# Altium footprint library amirlib.PcbLib: 456 footprints (part 5 of 29)
Each footprint in its own frame and in the unit in brackets; x right, y up, seen from the top. Pads: shape width x height; smd on the part's side, far side on the other; paste and mask are expansions set on the pad; w line width, h text height; cw(c..) or ccw(c..) is an arc to the next point about the centre after c.
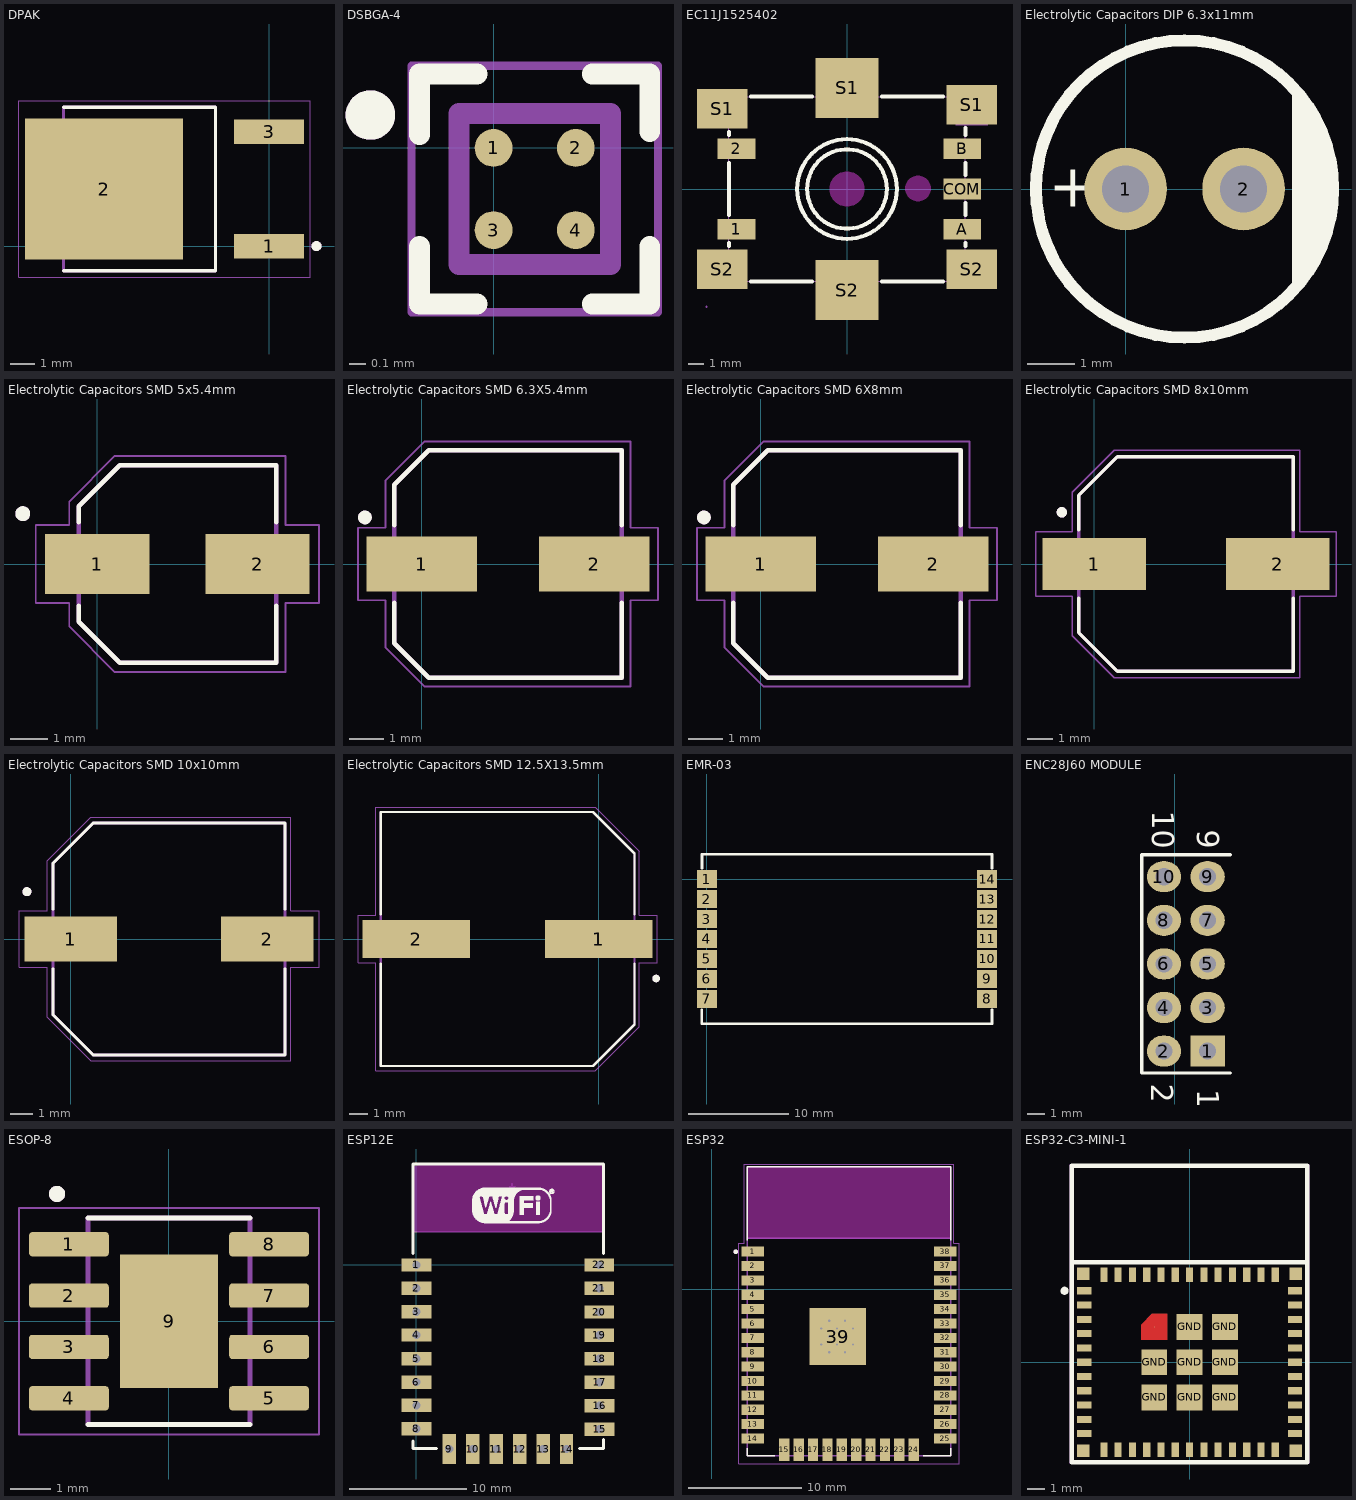
[diagram p4: the footprints below, top view; thin cyan lines are the x and y axes]

## DPAK [mm]
pads (3):
  rect 2.81x0.98 smd: 1(0,0) 3(0,4.58)
  rect 6.33x5.67 smd: 2(-6.62,2.29)
Top Overlay:
  circle w0.2: c1.905,0 r0.1
  lines w0.127: -8.245,-0.992 -2.145,-0.992 -2.145,5.573 -8.245,5.573
Top Paste:
  region: -9.495,4.835 -7.965,4.835 -7.965,3.525 -9.495,3.525
  region: -7.385,4.835 -5.855,4.835 -5.855,3.525 -7.385,3.525
  region: -5.275,4.835 -3.745,4.835 -3.745,3.525 -5.275,3.525
  region: -9.495,1.055 -7.965,1.055 -7.965,-0.255 -9.495,-0.255
  region: -7.385,1.055 -5.855,1.055 -5.855,-0.255 -7.385,-0.255
  region: -5.275,1.055 -3.745,1.055 -3.745,-0.255 -5.275,-0.255
  region: -9.495,2.945 -7.965,2.945 -7.965,1.635 -9.495,1.635
  region: -5.275,2.945 -3.745,2.945 -3.745,1.635 -5.275,1.635
  region: -7.385,2.945 -5.855,2.945 -5.855,1.635 -7.385,1.635
Mechanical 13:
  circle w0.2: c1.905,0 r0.1
  lines w0.127: -8.245,-0.992 -2.145,-0.992 -2.145,5.573 -8.245,5.573 -8.245,-0.992
Mechanical 15:
  lines w0.05: -10.035,-1.242 -10.035,5.822 1.655,5.822 1.655,-1.242 -10.035,-1.242

## DSBGA-4 [mm]
pads (4):
  round 0.23 smd: 1(0,0) 2(0.5,0) 3(0,-0.5) 4(0.5,-0.5)
Top Overlay:
  circle w0.15: c-0.75,0.2 r0.075
  lines w0.127: -0.45,-0.6 -0.45,-0.95 -0.1,-0.95 ; -0.45,0.08 -0.45,0.45 -0.1,0.45 ; 0.6,-0.95 0.95,-0.95 0.95,-0.6 ; 0.6,0.45 0.95,0.45 0.95,0.1
Mechanical 13:
  circle w0.15: c-0.75,0.2 r0.075
  lines w0.127: -0.21,-0.71 0.71,-0.71 0.71,0.21 -0.21,0.21 -0.21,-0.71
Mechanical 15:
  lines w0.05: -0.5,-1 1,-1 1,0.5 -0.5,0.5 -0.5,-1
3D body "TPS22908YZTR.STEP": height 0.63, standoff 0, extent -0.194,-0.694 0.694,0.194

## EC11J1525402 [mm]
pads (11):
  rect 2.4x1.3 smd paste+0 mask+0.05: 1(-7,-2.54) 2(-7,2.54) A(7.3,-2.54) B(7.3,2.54) COM(7.3,0)
  rect 3.2x2.5 smd paste+0 mask+0.05: S1(-7.9,5.08) S1(7.9,5.334) S2(-7.9,-5.08) S2(7.9,-5.08)
  rect 4x3.8 smd paste+0 mask+0.05: S1(0,6.4) S2(0,-6.4)
Top Overlay:
  circle w0.254: c0,0 r2.518
  circle w0.254: c0,0 r3.157
  lines w0.254: -7.473,-3.599 -7.473,-3.421 ; -7.473,-1.659 -7.473,1.659 ; -7.473,3.421 -7.473,3.599 ; -6.069,-5.852 -2.231,-5.852 ; -6.069,5.872 -2.231,5.872 ; 2.231,-5.852 6.069,-5.852 ; 2.231,5.847 6.069,5.847 ; 7.497,-3.599 7.497,-3.421 ; 7.497,-1.659 7.497,-0.881 ; 7.497,0.881 7.497,1.659 ; 7.497,3.421 7.497,3.853
Keep-Out Layer:
  board cut-out: 1.1,0 1.1,-0.145 1.025,-0.425 0.88,-0.675 0.675,-0.88 0.425,-1.025 0.145,-1.1 -0.145,-1.1 -0.425,-1.025 -0.675,-0.88 -0.88,-0.675 -1.025,-0.425 -1.1,-0.145 -1.1,0 -1.1,0.145 -1.025,0.425 -0.88,0.675 -0.675,0.88 -0.425,1.025 -0.145,1.1 0.145,1.1 0.425,1.025 0.675,0.88 0.88,0.675 1.025,0.425 1.1,0.145
  board cut-out: 5.3,0.027 5.3,-0.078 5.245,-0.282 5.14,-0.464 4.991,-0.613 4.809,-0.719 4.605,-0.773 4.395,-0.773 4.191,-0.719 4.009,-0.613 3.86,-0.464 3.755,-0.282 3.7,-0.078 3.7,0.027 3.7,0.132 3.755,0.336 3.86,0.518 4.009,0.667 4.191,0.772 4.395,0.827 4.605,0.827 4.809,0.772 4.991,0.667 5.14,0.518 5.245,0.336 5.3,0.132
Mechanical 15:
  region: -7.5,-2.89 -7.5,-2.19 -6.5,-2.19 -6.5,-2.89
  region: -7.5,2.19 -7.5,2.89 -6.5,2.89 -6.5,2.19
  region: 6.8,-2.89 6.8,-2.19 7.8,-2.19 7.8,-2.89
  region: 6.8,-0.35 6.8,0.35 7.8,0.35 7.8,-0.35
  region: 6.8,2.19 6.8,2.89 7.8,2.89 7.8,2.19
  region: 6.9,-5.85 6.9,-4.05 8.9,-4.05 8.9,-5.85
  region: 6.9,4.05 6.9,5.85 8.9,5.85 8.9,4.05
  region: -8.9,-5.85 -8.9,-4.05 -6.9,-4.05 -6.9,-5.85
  region: -8.9,4.05 -8.9,5.85 -6.9,5.85 -6.9,4.05
  region: -1.5,-7.455 -1.5,-5.805 1.5,-5.805 1.5,-7.455
  region: -1.5,5.831 -1.5,7.481 1.5,7.481 1.5,5.831
  region: -8.84,-7.455 -8.84,-7.48 -8.875,-7.515 -8.925,-7.515 -8.96,-7.48 -8.96,-7.455 -8.96,-7.43 -8.925,-7.395 -8.875,-7.395 -8.84,-7.43
  lines w0.051: -7.5,-5.85 7.5,-5.85 7.5,5.85 -7.5,5.85 -7.5,-5.85
3D body "User Library-EC11J.STEP": height 20.23, standoff -0.97, extent -8.822,-7.518 9.178,7.482

## Electrolytic Capacitors DIP 6.3x11mm [mm]
pads (2):
  round 1.75 hole 1 paste-2539.97 mask+0.05: 1(0,0) 2(2.5,0)
Top Overlay:
  circle w0.254: c1.25,0 r3.15
  region: 3.536,-2.286 3.535,2.17 3.536,2.169 3.645,2.06 3.842,1.82 4.014,1.563 4.16,1.29 4.278,1.004 4.368,0.708 4.428,0.404 4.459,0.096 4.459,-0.059 4.459,-0.213 4.428,-0.521 4.368,-0.825 4.278,-1.121 4.16,-1.407 4.014,-1.68 3.842,-1.937 3.645,-2.177
  lines w0.254: -1.9,0 cw(c1.25,0) 4.4,0 cw(c1.25,0) -1.9,0
  text "+" at -1.628,-0.381 h0.9
3D body "C49256811_JIERR_ERA50V47M6X11.step": height 11, standoff -4, extent -1.956,-3.227 4.344,3.073

## Electrolytic Capacitors SMD 5x5.4mm [mm]
pads (2):
  rect 2.8x1.6 smd: 1(0,0) 2(4.3,0)
Top Overlay:
  circle w0.2: c-2,1.35 r0.1
  lines w0.127: -0.5,-1.12 -0.5,-1.55 0.6,-2.65 4.8,-2.65 4.8,-1.12 ; -0.5,1.12 -0.5,1.55 0.6,2.65 4.8,2.65 4.8,1.12
Mechanical 13:
  circle w0.2: c-2,1.35 r0.1
  lines w0.127: -0.5,-1.55 -0.5,1.55 0.6,2.65 4.8,2.65 4.8,-2.65 0.6,-2.65 -0.5,-1.55
Mechanical 15:
  lines w0.05: -1.65,-1.05 -0.75,-1.05 -0.75,-1.675 0.475,-2.9 5.05,-2.9 5.05,-1.05 5.95,-1.05 5.95,1.05 5.05,1.05 5.05,2.9 0.475,2.9 -0.75,1.675 -0.75,1.05 -1.65,1.05 -1.65,-1.05
3D body "step_temp.STEP": height 5.8, standoff 0, extent -0.85,-2.65 5.15,2.65

## Electrolytic Capacitors SMD 6.3X5.4mm [mm]
pads (2):
  rect 3.2x1.6 smd: 1(0,0) 2(5,0)
Top Overlay:
  circle w0.2: c-1.65,1.35 r0.1
  lines w0.127: -0.8,-1.12 -0.8,-2.3 0.2,-3.3 5.8,-3.3 5.8,-1.12 ; -0.8,1.12 -0.8,2.3 0.2,3.3 5.8,3.3 5.8,1.12
Mechanical 13:
  circle w0.2: c-1.65,1.35 r0.1
  lines w0.127: -0.8,-2.3 -0.8,2.3 0.2,3.3 5.8,3.3 5.8,-3.3 0.2,-3.3 -0.8,-2.3
Mechanical 15:
  lines w0.05: -1.85,-1.05 -1.05,-1.05 -1.05,-2.425 0.075,-3.55 6.05,-3.55 6.05,-1.05 6.85,-1.05 6.85,1.05 6.05,1.05 6.05,3.55 0.075,3.55 -1.05,2.425 -1.05,1.05 -1.85,1.05 -1.85,-1.05
3D body "EEEFC0J101P.STEP": height 5.81, standoff 0.01, extent -1.11,-3.378 6.19,3.222

## Electrolytic Capacitors SMD 6X8mm [mm]
pads (2):
  rect 3.2x1.6 smd: 1(0,0) 2(5,0)
Top Overlay:
  circle w0.2: c-1.65,1.35 r0.1
  lines w0.127: -0.8,-1.12 -0.8,-2.3 0.2,-3.3 5.8,-3.3 5.8,-1.12 ; -0.8,1.12 -0.8,2.3 0.2,3.3 5.8,3.3 5.8,1.12
Mechanical 13:
  circle w0.2: c-1.65,1.35 r0.1
  lines w0.127: -0.8,-2.3 0.2,-3.3 5.8,-3.3 5.8,3.3 0.2,3.3 -0.8,2.3 -0.8,-2.3
Mechanical 15:
  lines w0.05: -1.85,-1.05 -1.85,1.05 -1.05,1.05 -1.05,2.425 0.075,3.55 6.05,3.55 6.05,1.05 6.85,1.05 6.85,-1.05 6.05,-1.05 6.05,-3.55 0.075,-3.55 -1.05,-2.425 -1.05,-1.05 -1.85,-1.05
3D body "step_temp.STEP": height 7.7, standoff 0, extent -1.25,-3.325 6.05,3.275

## Electrolytic Capacitors SMD 8x10mm [mm]
pads (2):
  rect 4x2 smd: 1(0,0) 2(7.1,0)
Top Overlay:
  circle w0.2: c-1.25,2 r0.1
  lines w0.127: -0.6,-1.32 -0.6,-2.65 0.9,-4.15 7.7,-4.15 7.7,-1.32 ; -0.6,1.32 -0.6,2.65 0.9,4.15 7.7,4.15 7.7,1.32
Mechanical 13:
  circle w0.2: c-1.25,2 r0.1
  lines w0.127: -0.6,-2.65 -0.6,2.65 0.9,4.15 7.7,4.15 7.7,-4.15 0.9,-4.15 -0.6,-2.65
Mechanical 15:
  lines w0.05: -2.25,-1.25 -0.85,-1.25 -0.85,-2.775 0.775,-4.4 7.95,-4.4 7.95,-1.25 9.35,-1.25 9.35,1.25 7.95,1.25 7.95,4.4 0.775,4.4 -0.85,2.775 -0.85,1.25 -2.25,1.25 -2.25,-1.25
3D body "step_temp.STEP": height 10.2, standoff 0, extent -1.275,-4.15 8.425,4.15

## Electrolytic Capacitors SMD 10x10mm [mm]
pads (2):
  rect 4.1x2 smd: 1(0,0) 2(8.7,0)
Top Overlay:
  circle w0.2: c-1.95,2.1 r0.1
  lines w0.127: -0.8,-1.32 -0.8,-3.35 1,-5.15 9.5,-5.15 9.5,-1.32 ; -0.8,1.32 -0.8,3.35 1,5.15 9.5,5.15 9.5,1.32
Mechanical 13:
  circle w0.2: c-1.95,2.1 r0.1
  lines w0.127: -0.8,-3.35 1,-5.15 9.5,-5.15 9.5,5.15 1,5.15 -0.8,3.35 -0.8,-3.35
Mechanical 15:
  lines w0.05: -2.3,-1.25 -2.3,1.25 -1.05,1.25 -1.05,3.475 0.875,5.4 9.75,5.4 9.75,1.25 11,1.25 11,-1.25 9.75,-1.25 9.75,-5.4 0.875,-5.4 -1.05,-3.475 -1.05,-1.25 -2.3,-1.25
3D body "step_temp.STEP": height 9.3, standoff -0.9, extent -1.5,-5.15 10.2,5.15

## Electrolytic Capacitors SMD 12.5X13.5mm [mm]
pads (2):
  rect 5.7x2 smd: 1(0,0) 2(-9.7,0)
Top Overlay:
  circle w0.2: c3.05,-2.1 r0.1
  lines w0.127: -11.6,-1.32 -11.6,-6.75 -0.3,-6.75 1.9,-4.55 1.9,-1.32 ; -11.6,1.32 -11.6,6.75 -0.3,6.75 1.9,4.55 1.9,1.32
Mechanical 13:
  circle w0.2: c3.05,-2.1 r0.1
  lines w0.127: -11.6,-6.75 -11.6,6.75 -0.3,6.75 1.9,4.55 1.9,-4.55 -0.3,-6.75 -11.6,-6.75
Mechanical 15:
  lines w0.05: -12.8,-1.25 -11.85,-1.25 -11.85,-7 -0.175,-7 2.15,-4.675 2.15,-1.25 3.1,-1.25 3.1,1.25 2.15,1.25 2.15,4.675 -0.175,7 -11.85,7 -11.85,1.25 -12.8,1.25 -12.8,-1.25
3D body "step_temp.STEP": height 13.5, standoff 0, extent -12.3,-6.75 2.6,6.75

## EMR-03 [mm]
pads (14):
  rect 2x1.8 smd: 1(0,0) 2(0,-2) 3(0,-4) 4(0,-6) 5(0,-8) 6(0,-10) 7(0,-12) 8(28.075,-12) 9(28.075,-10) 10(28.075,-8) 11(28.075,-6) 12(28.075,-4) 13(28.075,-2) 14(28.075,0)
Top Overlay:
  lines w0.254: -0.525,-13.1 -0.525,-14.5 28.575,-14.5 28.575,-13.1 ; -0.5,1.1 -0.5,2.5 28.575,2.5 28.575,1.1

## ENC28J60 MODULE [mm]
pads (10):
  rect 2x1.8 hole 1: 1(1.905,-18.318)
  oval 2x1.8 hole 1: 2(-0.635,-18.318) 3(1.905,-15.778) 4(-0.635,-15.778) 5(1.905,-13.238) 6(-0.635,-13.238) 7(1.905,-10.698) 8(-0.635,-10.698) 9(1.905,-8.158) 10(-0.635,-8.158)
Top Overlay:
  lines w0.2: 3.214,-19.591 -1.92,-19.591 -1.92,-6.888 3.214,-6.888
  text "9" at 1.299,-5.421 h1.27
  text "10" at -1.326,-4.321 h1.27
  text "2" at -1.376,-20.221 h1.27
  text "1" at 1.299,-20.521 h1.27
3D body "PBD-2.stp": height 2.75, standoff -8.9, extent -1.905,-9.428 3.175,-6.888
3D body "PBD-2.stp": height 2.75, standoff -8.9, extent -1.905,-14.508 3.175,-11.968
3D body "PBD-2.stp": height 2.75, standoff -8.9, extent -1.905,-11.968 3.175,-9.428
3D body "PBD-2.stp": height 2.75, standoff -8.9, extent -1.905,-19.588 3.175,-17.048
3D body "PBD-2.stp": height 2.75, standoff -8.9, extent -1.905,-17.048 3.175,-14.508
3D body "User Library-ENC28J60-Module.STEP": height 2.3, standoff -14.2, extent -53.883,-30.771 3.399,3.729

## ESOP-8 [mm]
pads (9):
  rrect25% 1.97x0.6 smd: 1(-2.475,1.905) 2(-2.475,0.635) 3(-2.475,-0.635) 4(-2.475,-1.905) 5(2.475,-1.905) 6(2.475,-0.635) 7(2.475,0.635) 8(2.475,1.905)
  rect 2.413x3.302 smd paste-3: 9(0,0)
Top Overlay:
  circle w0.2: c-2.769,3.15 r0.1
  lines w0.127: -2,-2.55 2,-2.55 ; -2,2.55 2,2.55
Top Paste:
  region: 0.645,-0.82 -0.645,-0.82 -0.645,0.82 0.645,0.82
Mechanical 13:
  circle w0.2: c-2.769,3.15 r0.1
  lines w0.127: -2,-2.55 -2,2.55 2,2.55 2,-2.55 -2,-2.55
Mechanical 15:
  lines w0.05: -3.71,-2.8 -3.71,2.8 3.71,2.8 3.71,-2.8 -3.71,-2.8
3D body "step_temp.STEP": height 1.75, standoff 0, extent -3,-2.45 3,2.45

## ESP12E [mil]
pads (22):
  rect 100x45 hole 27.56: 1(0,0) 2(0,-78) 3(0,-157) 4(0,-235) 5(0,-315) 6(0,-393) 7(0,-471) 8(0,-550) 15(615,-551) 16(615,-472) 17(615,-394) 18(614,-315) 19(614,-236) 20(614,-158) 21(614,-78) 22(614,0)
  rect 45x100 hole 27.56: 9(110.24,-618.11) 10(188.98,-618.11) 11(267.72,-618.11) 12(346.46,-618.11) 13(425.2,-618.11) 14(503.94,-618.11)
Top Overlay:
  drawing of 1267 lines, arcs and shapes, not listed
Keep-Out Layer:
  region: -12,339 628,339 628,111.97 -9.96,111.97
Mechanical 13:
  lines w2: -9.96,111.97 630.04,111.97
  text "ANTENNA AREA" at 0.04,314.59 h10
Mechanical 15:
  lines w3.94: 312,261.92 332,261.92 ; 322,251.92 322,271.92
3D body "ESP_12_ENew.STEP": height 150.35, standoff -1.94, extent -7.87,-606.9 622.61,339.19

## ESP32 [mm]
pads (51):
  rect 2x0.9 smd: 1(3.642,3.33) 2(3.642,2.06) 3(3.642,0.79) 4(3.642,-0.48) 5(3.642,-1.75) 6(3.642,-3.02) 7(3.642,-4.29) 8(3.642,-5.56) 9(3.642,-6.83) 10(3.642,-8.1) 11(3.642,-9.37) 12(3.642,-10.64) 13(3.642,-11.91) 14(3.642,-13.18) 25(20.642,-13.18) 26(20.642,-11.91) 27(20.642,-10.64) 28(20.642,-9.37) 29(20.642,-8.1) 30(20.642,-6.83) 31(20.642,-5.56) 32(20.642,-4.29) 33(20.642,-3.02) 34(20.642,-1.75) 35(20.642,-0.48) 36(20.642,0.79) 37(20.642,2.06) 38(20.642,3.33)
  rect 0.9x2 smd: 15(6.427,-14.18) 16(7.697,-14.18) 17(8.967,-14.18) 18(10.237,-14.18) 19(11.507,-14.18) 20(12.777,-14.18) 21(14.047,-14.18) 22(15.317,-14.18) 23(16.587,-14.18) 24(17.857,-14.18)
  round 0.4 hole 0.2 mask+0: 39(9.689,-4.869) 39(9.689,-3.469) 39(10.389,-5.569) 39(10.389,-4.169) 39(10.389,-2.769) 39(11.089,-4.869) 39(11.089,-3.469) 39(11.789,-5.569) 39(11.789,-4.169) 39(11.789,-2.769) 39(12.489,-4.869) 39(12.489,-3.469)
  rect 5x5 smd: 39(11.142,-4.17)
Top Overlay:
  circle w0.2: c2.142,3.32 r0.1
  lines w0.127: 3.142,-14.03 3.142,-14.68 5.592,-14.68 ; 3.142,4.32 3.142,10.82 21.142,10.82 21.142,4.32 ; 18.692,-14.68 21.142,-14.68 21.142,-14.03
Keep-Out Layer:
  region: 21.142,4.52 3.142,4.52 3.142,10.82 21.142,10.82
Mechanical 13:
  circle w0.2: c2.142,3.32 r0.1
  lines w0.127: 3.142,4.52 21.142,4.52 ; 3.142,4.52 3.142,10.82 21.142,10.82 21.142,4.52 ; 3.142,4.52 3.142,-14.68 21.142,-14.68 21.142,4.52
  text "ANTENNA" at 6.142,7.07 h1.78
Mechanical 15:
  lines w0.05: 2.392,-15.43 2.392,4.07 2.892,4.07 2.892,11.07 21.392,11.07 21.392,4.07 21.892,4.07 21.892,-15.43 2.392,-15.43
3D body "step_temp.STEP": height 3.25, standoff 0, extent 3.142,-14.68 21.142,10.82

## ESP32-C3-MINI-1 [mm]
pads (61):
  rect 0.8x0.4 smd paste+0 mask+0.05: 3(-5.9,2.4) 4(-5.9,1.6) 5(-5.9,0.8) 6(-5.9,0) 7(-5.9,-0.8) 8(-5.9,-1.6) 9(-5.9,-2.4) 10(-5.9,-3.2) 25(5.9,-4) 26(5.9,-3.2) 27(5.9,-2.4) 28(5.9,-1.6) 29(5.9,-0.8) 30(5.9,0) 31(5.9,0.8) 32(5.9,1.6) 33(5.9,2.4) 34(5.9,3.2) 35(5.9,4) GND(-5.9,-4) GND(-5.9,3.2) GND(-5.9,4)
  rect 0.4x0.8 smd paste+0 mask+0.05: 12(-4.8,-4.9) 13(-4,-4.9) 15(-2.4,-4.9) 16(-1.6,-4.9) 17(-0.8,-4.9) 18(0,-4.9) 19(0.8,-4.9) 20(1.6,-4.9) 21(2.4,-4.9) 22(3.2,-4.9) 23(4,-4.9) 24(4.8,-4.9) GND(-4.8,4.9) GND(-4,4.9) GND(-3.2,-4.9) GND(-3.2,4.9) GND(-2.4,4.9) GND(-1.6,4.9) GND(-0.8,4.9) GND(0,4.9) GND(0.8,4.9) GND(1.6,4.9) GND(2.4,4.9) GND(3.2,4.9) GND(4,4.9) GND(4.8,4.9)
  rect 0.7x0.7 smd paste+0 mask+0.05: GND(-5.95,-4.95) GND(-5.95,4.95) GND(5.95,-4.95) GND(5.95,4.95)
  round 0.025 smd: GND(-1.988,1.978)
  rect 1.45x1.45 smd paste+0 mask+0.05: GND(-1.975,-1.975) GND(-1.975,0) GND(0,-1.975) GND(0,0) GND(0,1.975) GND(1.975,-1.975) GND(1.975,0) GND(1.975,1.975)
Top Layer:
  region: -2.713,1.253 -1.263,1.253 -1.263,2.703 -2.113,2.703 -2.713,2.103
Top Overlay:
  circle w0.254: c-7,4 r0.1
  lines w0.254: -6.6,5.6 6.6,5.6 ; -6.6,-5.6 6.6,-5.6 6.6,11 -6.6,11 -6.6,-5.6
Mechanical 15:
  region: -6.5,5.7 -6.5,5.5 6.5,5.5 6.5,5.7
  region: -6.7,11.1 -6.7,-5.7 6.7,-5.7 6.7,11.1 -6.6,11.1 -6.5,10.9 6.5,10.9 6.5,-5.5 -6.5,-5.5 -6.5,10.9
3D body "ESP32-C3-MINI-1-H4.STEP": height 2.55, standoff 0, extent -6.6,-5.6 6.6,11